# Altium schematic symbol library 2716-103.SchLib: 1 symbol
Pins are listed as number, name and electrical type; pins without a type are passive.

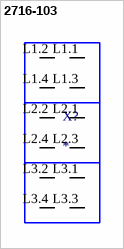
[diagram p0: symbol 2716-103]

## 2716-103
designator X?
Conn Terminal Strip 3 POS 3.8mm Solder Thru-Hole 76A Box; MF: WAGO Innovative Connections; MP: 2716-103; Package: None; Value: *; Check_prices: https://www.snapeda.com/parts/2716-103/Nova/view-part/3625031/?ref=eda; SnapEDA_Link: https://www.snapeda.com/parts/2716-103/Nova/view-part/3625031/?ref=snap; Availability: Warning; Price: None
footprint P-2716-103
pins: L1.1 P1.1 (io), L1.2 P1.2 (io), L1.3 P1.3 (io), L1.4 P1.4 (io), L2.1 P2.1 (io), L2.2 P2.2 (io), L2.3 P2.3 (io), L2.4 P2.4 (io), L3.1 P3.1 (io), L3.2 P3.2 (io), L3.3 P3.3 (io), L3.4 P3.4 (io)